# Altium footprint library C25804_R0603.PcbLib: 1 footprints
Each footprint in its own frame and in the unit in brackets; x right, y up, seen from the top. Pads: shape width x height; smd on the part's side, far side on the other; paste and mask are expansions set on the pad; w line width, h text height; cw(c..) or ccw(c..) is an arc to the next point about the centre after c.
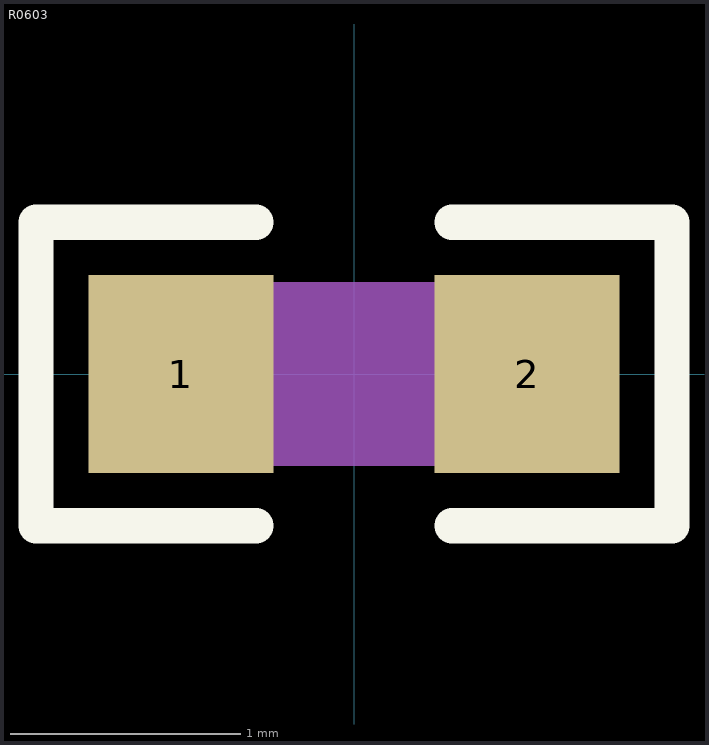
[diagram p0: the footprint, top view; thin cyan lines are the x and y axes]

## R0603 [mm] "10KΩ (1002) ±1%"
pads (2):
  rect 0.806x0.864 smd paste-100 mask+0.051: 1(-0.753,0) 2(0.753,0)
TOPOVERLAY:
  lines w0.152: -0.426,-0.661 -1.385,-0.661 -1.385,0.661 -0.426,0.661 ; 0.426,-0.661 1.385,-0.661 1.385,0.661 0.426,0.661
TOPPASTE:
  region: 1.195,0.45 0.395,0.45 0.345,0.4 0.345,0.172 0.715,0.172 0.715,-0.158 0.345,-0.158 0.345,-0.4 0.395,-0.45 1.195,-0.45 1.245,-0.4 1.245,0.4
  region: -1.195,-0.45 -0.395,-0.45 -0.345,-0.4 -0.345,-0.172 -0.715,-0.172 -0.715,0.158 -0.345,0.158 -0.345,0.4 -0.395,0.45 -1.195,0.45 -1.245,0.4 -1.245,-0.4
MECHANICAL9:
  region: -0.8,-0.4 -0.8,0.4 0.8,0.4 0.8,-0.4
MECHANICAL11:
  region: -0.77,-0.4 -0.774,-0.415 -0.785,-0.426 -0.8,-0.43 -0.815,-0.426 -0.826,-0.415 -0.83,-0.4 -0.826,-0.385 -0.815,-0.374 -0.8,-0.37 -0.785,-0.374 -0.774,-0.385
MECHANICAL12:
  region: -0.8,-0.4 -0.8,0.4 -0.5,0.4 -0.5,-0.4
  region: 0.8,-0.4 0.8,0.4 0.5,0.4 0.5,-0.4
3D body "e52f17888a8c6c2cb8d56dccf25e2ed131a12a241311657622543c405e42826c.step": height 0, standoff 0, extent -1.156,-0.432 1.156,0.432